# Altium footprint library Connectors.PcbLib: 228 footprints (part 8 of 15)
Each footprint in its own frame and in the unit in brackets; x right, y up, seen from the top. Pads: shape width x height; smd on the part's side, far side on the other; paste and mask are expansions set on the pad; w line width, h text height; cw(c..) or ccw(c..) is an arc to the next point about the centre after c.
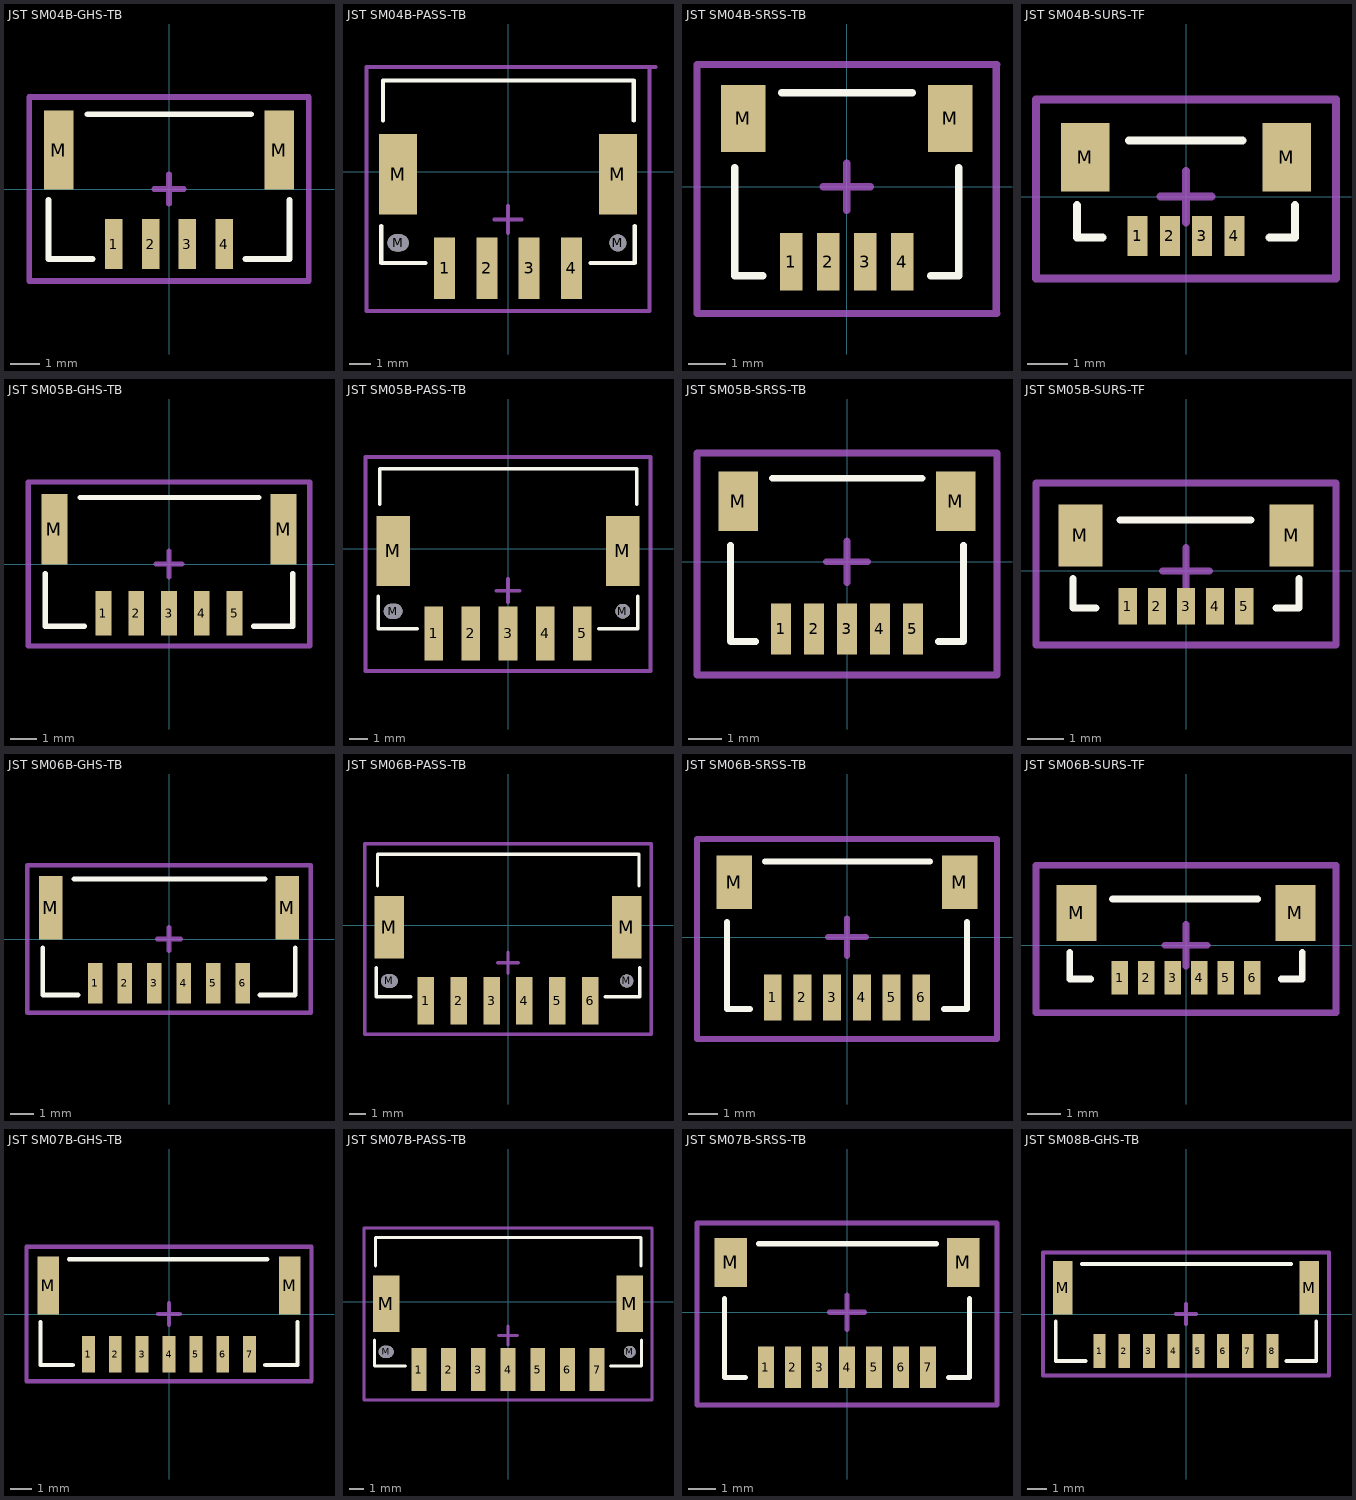
[diagram p7: the footprints below, top view; thin cyan lines are the x and y axes]

## JST SM04B-GHS-TB [mm] "1.25mm pitch/Disconnectable Crimp style connectors"
height 4.35
pads (6):
  rect 0.6x1.7 smd: 1(-1.875,-1.875) 2(-0.625,-1.875) 3(0.625,-1.875) 4(1.875,-1.875)
  rect 1x2.7 smd: M(-3.75,1.325) M(3.75,1.325)
Top Overlay:
  lines w0.2: -4.1,-0.375 -4.1,-2.375 -2.6,-2.375 ; -2.774,2.54 2.794,2.54 ; 2.6,-2.375 4.1,-2.375 4.1,-0.375
Top Courtyard:
  lines w0.2: -0.5,0 0.5,0 ; 0,-0.5 0,0.5 ; -4.75,-3.125 -4.75,3.125 4.75,3.125 4.75,-3.125 -4.75,-3.125
3D body "JST SM04B-GHS-TB.STEP": height 4.35, standoff 0, extent -4.125,-2.31 4.125,2.54

## JST SM04B-PASS-TB [mm] "JST PA Series 2mm pitch, side entry connector"
height 5.7
pads (8):
  rect 1x2.9 smd: 1(-3,-4.575) 2(-1,-4.575) 3(1,-4.575) 4(3,-4.575)
  oval 1x0.8 hole 0.8 slot 1 at 0 deg unplated mask+0.102: M(-5.2,-3.375)
  rect 1.8x3.8 smd: M(-5.2,-0.125) M(5.2,-0.125)
  round 0.8 hole 0.8 unplated mask+0.102: M(5.2,-3.375)
Top Overlay:
  lines w0.2: -6,-2.575 -6,-4.325 -3.905,-4.325 ; -5.921,2.41 -5.921,4.315 5.953,4.315 5.953,2.41 ; 3.905,-4.325 6,-4.325 6,-2.575
Top Courtyard:
  lines w0.2: -0.635,-2.265 0.635,-2.265 ; 0,-2.9 0,-1.63 ; 6.699,4.953 6.699,-6.607 -6.699,-6.607 -6.699,4.953 6.985,4.953
3D body "JST SM04B-PASS-TB.STEP": height 5.8, standoff 0, extent -6,-5.641 6,4.359

## JST SM04B-SRSS-TB [mm] "1.0mm pitch/Disconnectable Crimp style connector"
height 2.95
pads (6):
  rect 0.6x1.55 smd: 1(-1.5,-2.032) 2(-0.5,-2.032) 3(0.5,-2.032) 4(1.5,-2.032)
  rect 1.2x1.8 smd: M(-2.8,1.843) M(2.8,1.843)
Top Overlay:
  lines w0.2: -3.032,0.508 -3.032,-2.413 -2.27,-2.413 ; -1.762,2.54 1.778,2.54 ; 2.27,-2.413 3.032,-2.413 3.032,0.508
Top Courtyard:
  lines w0.2: -0.635,0 0.635,0 ; 0,-0.635 0,0.635 ; 4.048,-3.429 4.048,3.302 ; 4.064,-3.429 -4.048,-3.429 -4.048,3.302 4.064,3.302
3D body "JST SM04B-SRSS-TB.STEP": height 2.95, standoff -0.01, extent -3,-2.383 3,2.567

## JST SM04B-SURS-TF [mm] "1.0mm pitch/Disconnectable Crimp style connector"
height 2.95
pads (6):
  rect 0.5x1 smd: 1(-1.2,-0.975) 2(-0.4,-0.975) 3(0.4,-0.975) 4(1.2,-0.975)
  rect 1.2x1.7 smd: M(-2.5,0.975) M(2.5,0.975)
Top Overlay:
  lines w0.2: -2.705,-0.213 -2.705,-1.016 -2.07,-1.016 ; -1.416,1.397 1.397,1.397 ; 2.07,-1.016 2.705,-1.016 2.705,-0.213
Top Courtyard:
  lines w0.2: -0.635,0 0.635,0 ; 0,-0.635 0,0.635 ; -3.721,-2.032 3.721,-2.032 3.721,2.413 -3.721,2.413 -3.721,-2.032
3D body "JST SM04B-SURS-TF.STEP": height 1.75, standoff 0, extent -2.7,-1.303 2.7,1.397

## JST SM05B-GHS-TB [mm] "1.25mm pitch/Disconnectable Crimp style connectors"
height 4.35
pads (7):
  rect 0.6x1.7 smd: 1(-2.5,-1.875) 2(-1.25,-1.875) 3(0,-1.875) 4(1.25,-1.875) 5(2.5,-1.875)
  rect 1x2.7 smd: M(-4.375,1.325) M(4.375,1.325)
Top Overlay:
  lines w0.2: -4.725,-0.375 -4.725,-2.375 -3.225,-2.375 ; -3.399,2.54 3.429,2.54 ; 3.225,-2.375 4.725,-2.375 4.725,-0.375
Top Courtyard:
  lines w0.2: -0.5,0 0.5,0 ; 0,-0.5 0,0.5 ; -5.375,-3.125 -5.375,3.125 5.375,3.125 5.375,-3.125 -5.375,-3.125
3D body "JST SM05B-GHS-TB.STEP": height 4.35, standoff 0, extent -4.75,-2.31 4.75,2.54

## JST SM05B-PASS-TB [mm] "JST PA Series 2mm pitch, side entry connector"
height 5.7
pads (9):
  rect 1x2.9 smd: 1(-4,-4.575) 2(-2,-4.575) 3(0,-4.575) 4(2,-4.575) 5(4,-4.575)
  oval 1x0.8 hole 0.8 slot 1 at 0 deg unplated mask+0.102: M(-6.2,-3.375)
  rect 1.8x3.8 smd: M(-6.2,-0.125) M(6.2,-0.125)
  round 0.8 hole 0.8 unplated mask+0.102: M(6.2,-3.375)
Top Overlay:
  lines w0.2: -7,-2.575 -7,-4.325 -4.905,-4.325 ; -6.921,2.41 -6.921,4.315 6.953,4.315 6.953,2.41 ; 4.905,-4.325 7,-4.325 7,-2.575
Top Courtyard:
  lines w0.2: -0.635,-2.265 0.635,-2.265 ; 0,-2.9 0,-1.63 ; -7.699,-6.607 -7.699,4.953 7.699,4.953 7.699,-6.607 -7.699,-6.607
3D body "JST SM05B-PASS-TB.STEP": height 5.8, standoff 0, extent -7,-5.641 7,4.359

## JST SM05B-SRSS-TB [mm] "1.0mm pitch/Disconnectable Crimp style connector"
height 2.95
pads (7):
  rect 0.6x1.55 smd: 1(-2,-2.032) 2(-1,-2.032) 3(0,-2.032) 4(1,-2.032) 5(2,-2.032)
  rect 1.2x1.8 smd: M(-3.3,1.843) M(3.3,1.843)
Top Overlay:
  lines w0.2: -3.532,0.508 -3.532,-2.413 -2.77,-2.413 ; -2.262,2.54 2.286,2.54 ; 2.77,-2.413 3.532,-2.413 3.532,0.508
Top Courtyard:
  lines w0.2: -0.635,0 0.635,0 ; 0,-0.635 0,0.635 ; -4.548,-3.429 -4.548,3.302 4.548,3.302 4.548,-3.429 -4.548,-3.429
3D body "JST SM05B-SRSS-TB.STEP": height 2.95, standoff -0.01, extent -3.5,-2.383 3.5,2.567

## JST SM05B-SURS-TF [mm] "1.0mm pitch/Disconnectable Crimp style connector"
height 2.95
pads (7):
  rect 0.5x1 smd: 1(-1.6,-0.975) 2(-0.8,-0.975) 3(0,-0.975) 4(0.8,-0.975) 5(1.6,-0.975)
  rect 1.2x1.7 smd: M(-2.9,0.975) M(2.9,0.975)
Top Overlay:
  lines w0.2: -3.105,-0.213 -3.105,-1.016 -2.47,-1.016 ; -1.816,1.397 1.778,1.397 ; 2.47,-1.016 3.105,-1.016 3.105,-0.213
Top Courtyard:
  lines w0.2: -0.635,0 0.635,0 ; 0,-0.635 0,0.635 ; -4.121,-2.032 -4.121,2.413 4.121,2.413 4.121,-2.032 -4.121,-2.032
3D body "JST SM05B-SURS-TF.STEP": height 1.75, standoff 0, extent -3.1,-1.303 3.1,1.397

## JST SM06B-GHS-TB [mm] "1.25mm pitch/Disconnectable Crimp style connectors"
height 4.35
pads (8):
  rect 0.6x1.7 smd: 1(-3.125,-1.875) 2(-1.875,-1.875) 3(-0.625,-1.875) 4(0.625,-1.875) 5(1.875,-1.875) 6(3.125,-1.875)
  rect 1x2.7 smd: M(-5,1.325) M(5,1.325)
Top Overlay:
  lines w0.2: -5.35,-0.375 -5.35,-2.375 -3.85,-2.375 ; -4.024,2.54 4.064,2.54 ; 3.85,-2.375 5.35,-2.375 5.35,-0.375
Top Courtyard:
  lines w0.2: -0.5,0 0.5,0 ; 0,-0.5 0,0.5 ; -6,-3.125 -6,3.125 6,3.125 6,-3.125 -6,-3.125
3D body "JST SM06B-GHS-TB.STEP": height 4.35, standoff 0, extent -5.375,-2.31 5.375,2.54

## JST SM06B-PASS-TB [mm] "JST PA Series 2mm pitch, side entry connector"
height 5.7
pads (10):
  rect 1x2.9 smd: 1(-5,-4.575) 2(-3,-4.575) 3(-1,-4.575) 4(1,-4.575) 5(3,-4.575) 6(5,-4.575)
  oval 1x0.8 hole 0.8 slot 1 at 0 deg unplated mask+0.102: M(-7.2,-3.375)
  rect 1.8x3.8 smd: M(-7.2,-0.125) M(7.2,-0.125)
  round 0.8 hole 0.8 unplated mask+0.102: M(7.2,-3.375)
Top Overlay:
  lines w0.2: -8,-2.575 -8,-4.325 -5.905,-4.325 ; -7.921,2.41 -7.921,4.315 7.953,4.315 7.953,2.41 ; 5.905,-4.325 8,-4.325 8,-2.575
Top Courtyard:
  lines w0.2: -0.635,-2.265 0.635,-2.265 ; 0,-2.9 0,-1.63 ; -8.699,-6.607 -8.699,4.953 8.699,4.953 8.699,-6.607 -8.699,-6.607
3D body "JST SM06B-PASS-TB.STEP": height 5.8, standoff 0, extent -8,-5.641 8,4.359

## JST SM06B-SRSS-TB [mm] "1.0mm pitch/Disconnectable Crimp style connector"
height 2.95
pads (8):
  rect 0.6x1.55 smd: 1(-2.5,-2.032) 2(-1.5,-2.032) 3(-0.5,-2.032) 4(0.5,-2.032) 5(1.5,-2.032) 6(2.5,-2.032)
  rect 1.2x1.8 smd: M(-3.8,1.843) M(3.8,1.843)
Top Overlay:
  lines w0.2: -4.032,0.508 -4.032,-2.413 -3.27,-2.413 ; -2.762,2.54 2.794,2.54 ; 3.27,-2.413 4.032,-2.413 4.032,0.508
Top Courtyard:
  lines w0.2: -0.635,0 0.635,0 ; 0,-0.635 0,0.635 ; -5.048,-3.429 5.048,-3.429 5.048,3.302 -5.048,3.302 -5.048,-3.429
3D body "JST SM06B-SRSS-TB.STEP": height 2.95, standoff -0.01, extent -4,-2.383 4,2.567

## JST SM06B-SURS-TF [mm] "1.0mm pitch/Disconnectable Crimp style connector"
height 2.95
pads (8):
  rect 0.5x1 smd: 1(-2,-0.975) 2(-1.2,-0.975) 3(-0.4,-0.975) 4(0.4,-0.975) 5(1.2,-0.975) 6(2,-0.975)
  rect 1.2x1.7 smd: M(-3.3,0.975) M(3.3,0.975)
Top Overlay:
  lines w0.2: -3.505,-0.213 -3.505,-1.016 -2.87,-1.016 ; -2.216,1.397 2.159,1.397 ; 2.87,-1.016 3.505,-1.016 3.505,-0.213
Top Courtyard:
  lines w0.2: -0.635,0 0.635,0 ; 0,-0.635 0,0.635 ; -4.521,-2.032 -4.521,2.413 4.521,2.413 4.521,-2.032 -4.521,-2.032
3D body "JST SM06B-SURS-TF.STEP": height 1.75, standoff 0, extent -3.5,-1.303 3.5,1.397

## JST SM07B-GHS-TB [mm] "1.25mm pitch/Disconnectable Crimp style connectors"
height 4.35
pads (9):
  rect 0.6x1.7 smd: 1(-3.75,-1.875) 2(-2.5,-1.875) 3(-1.25,-1.875) 4(0,-1.875) 5(1.25,-1.875) 6(2.5,-1.875) 7(3.75,-1.875)
  rect 1x2.7 smd: M(-5.625,1.325) M(5.625,1.325)
Top Overlay:
  lines w0.2: -5.975,-0.375 -5.975,-2.375 -4.475,-2.375 ; -4.649,2.54 4.572,2.54 ; 4.475,-2.375 5.975,-2.375 5.975,-0.375
Top Courtyard:
  lines w0.2: -0.5,0 0.5,0 ; 0,-0.5 0,0.5 ; -6.625,-3.125 -6.625,3.125 6.625,3.125 6.625,-3.125 -6.625,-3.125
3D body "JST SM07B-GHS-TB.STEP": height 4.35, standoff 0, extent -6,-2.31 6,2.54

## JST SM07B-PASS-TB [mm] "JST PA Series 2mm pitch, side entry connector"
height 5.7
pads (11):
  rect 1x2.9 smd: 1(-6,-4.575) 2(-4,-4.575) 3(-2,-4.575) 4(0,-4.575) 5(2,-4.575) 6(4,-4.575) 7(6,-4.575)
  oval 1x0.8 hole 0.8 slot 1 at 0 deg unplated mask+0.102: M(-8.2,-3.375)
  rect 1.8x3.8 smd: M(-8.2,-0.125) M(8.2,-0.125)
  round 0.8 hole 0.8 unplated mask+0.102: M(8.2,-3.375)
Top Overlay:
  lines w0.2: -9,-2.575 -9,-4.325 -6.905,-4.325 ; -8.921,2.41 -8.921,4.315 8.953,4.315 8.953,2.41 ; 6.905,-4.325 9,-4.325 9,-2.575
Top Courtyard:
  lines w0.2: -0.635,-2.265 0.635,-2.265 ; 0,-2.9 0,-1.63 ; -9.699,-6.607 9.699,-6.607 9.699,4.953 -9.699,4.953 -9.699,-6.607
3D body "JST SM07B-PASS-TB.STEP": height 5.8, standoff 0, extent -9,-5.641 9,4.359

## JST SM07B-SRSS-TB [mm] "1.0mm pitch/Disconnectable Crimp style connector"
height 2.95
pads (9):
  rect 0.6x1.55 smd: 1(-3,-2.032) 2(-2,-2.032) 3(-1,-2.032) 4(0,-2.032) 5(1,-2.032) 6(2,-2.032) 7(3,-2.032)
  rect 1.2x1.8 smd: M(-4.3,1.843) M(4.3,1.843)
Top Overlay:
  lines w0.2: -4.532,0.508 -4.532,-2.413 -3.77,-2.413 ; -3.262,2.54 3.302,2.54 ; 3.77,-2.413 4.532,-2.413 4.532,0.508
Top Courtyard:
  lines w0.2: -0.635,0 0.635,0 ; 0,-0.635 0,0.635 ; -5.548,-3.429 -5.548,3.302 5.548,3.302 5.548,-3.429 -5.548,-3.429
3D body "JST SM07B-SRSS-TB.STEP": height 2.95, standoff -0.01, extent -4.5,-2.383 4.5,2.567

## JST SM08B-GHS-TB [mm] "1.25mm pitch/Disconnectable Crimp style connectors"
height 4.35
pads (10):
  rect 0.6x1.7 smd: 1(-4.375,-1.875) 2(-3.125,-1.875) 3(-1.875,-1.875) 4(-0.625,-1.875) 5(0.625,-1.875) 6(1.875,-1.875) 7(3.125,-1.875) 8(4.375,-1.875)
  rect 1x2.7 smd: M(-6.25,1.325) M(6.25,1.325)
Top Overlay:
  lines w0.2: -6.6,-0.375 -6.6,-2.375 -5.1,-2.375 ; -5.274,2.54 5.334,2.54 ; 5.1,-2.375 6.6,-2.375 6.6,-0.375
Top Courtyard:
  lines w0.2: -0.5,0 0.5,0 ; 0,-0.5 0,0.5 ; -7.25,-3.125 -7.25,3.125 7.25,3.125 7.25,-3.125 -7.25,-3.125
3D body "JST SM08B-GHS-TB.STEP": height 4.35, standoff -0.05, extent -6.625,-2.31 6.625,2.54